# Altium footprint library MAJ library.PcbLib: 43 footprints (part 1 of 3)
Each footprint in its own frame and in the unit in brackets; x right, y up, seen from the top. Pads: shape width x height; smd on the part's side, far side on the other; paste and mask are expansions set on the pad; w line width, h text height; cw(c..) or ccw(c..) is an arc to the next point about the centre after c.
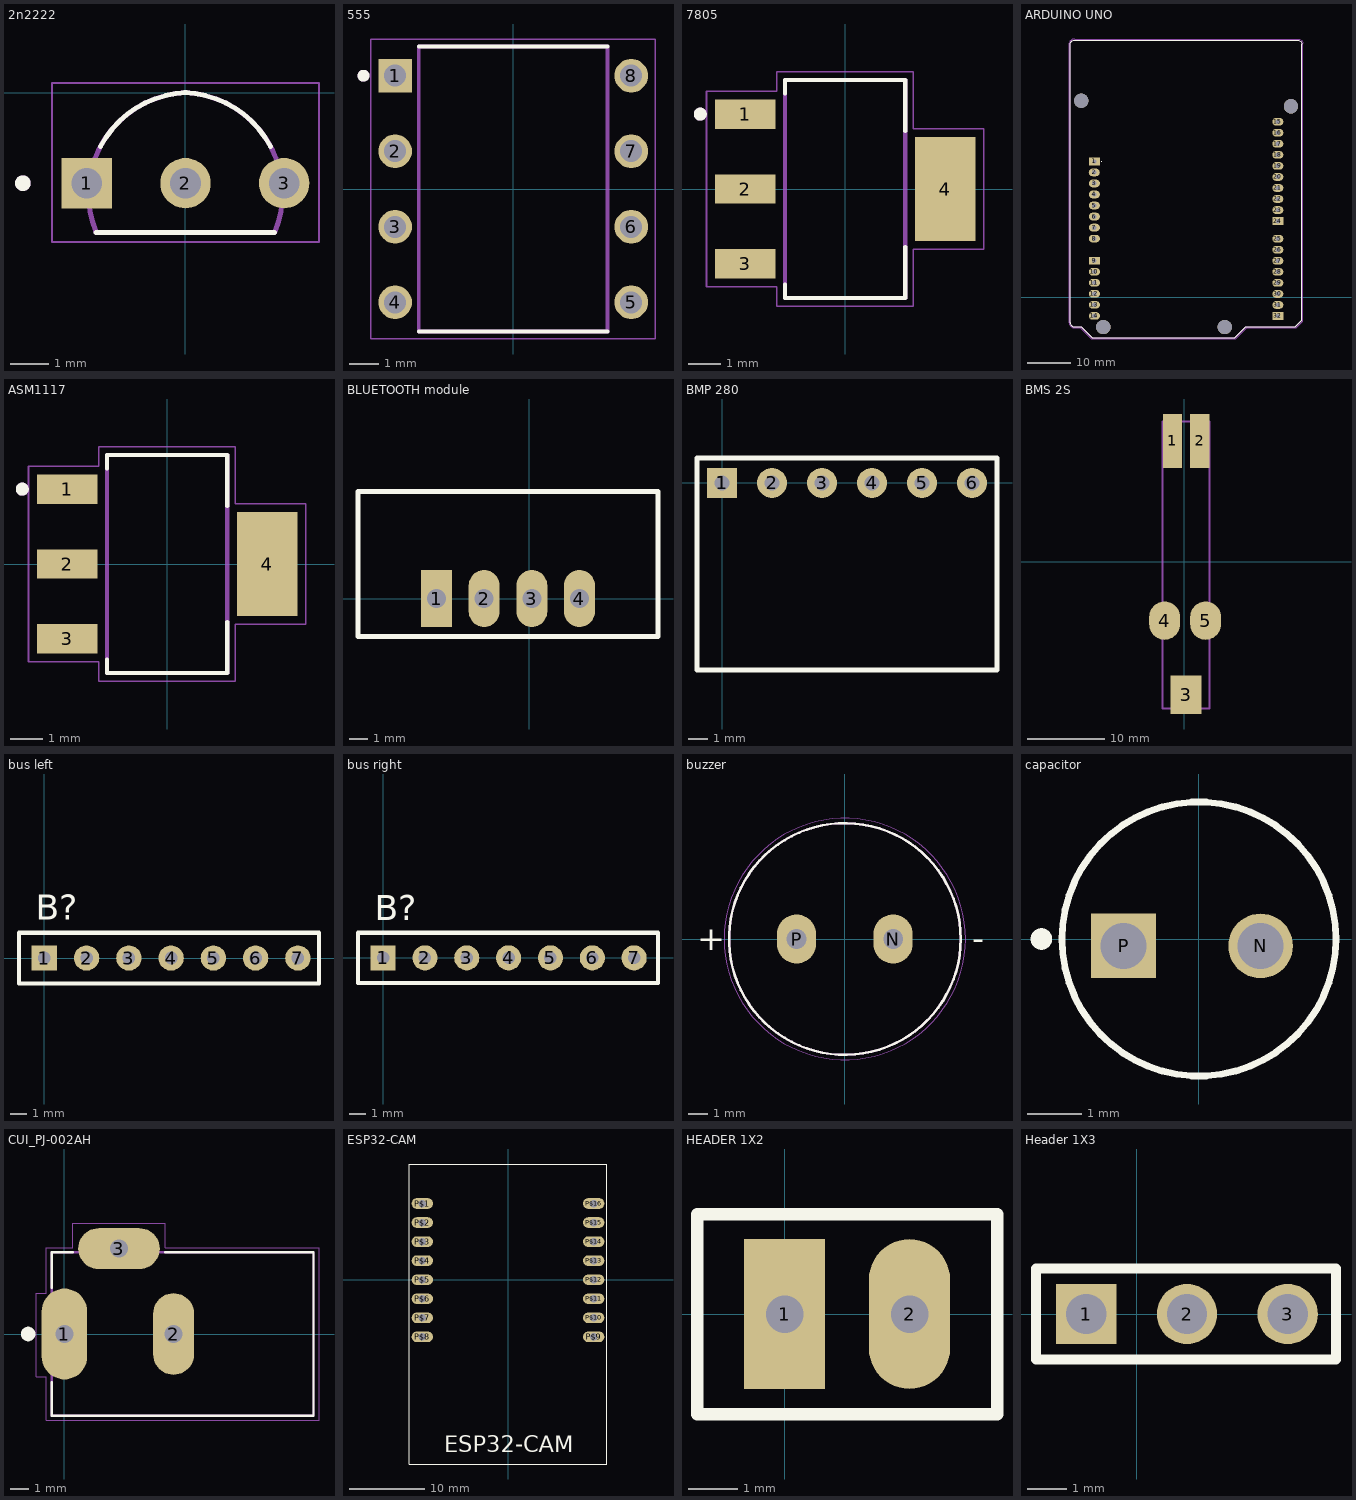
[diagram p0: the footprints below, top view; thin cyan lines are the x and y axes]

## 2n2222 [mm]
height 7.5
pads (3):
  rect 1.298x1.298 / inner round 1.298 / far side rect 1.298x1.298 hole 0.79: 1(-2.54,-2.33)
  round 1.298 hole 0.79: 2(0,-2.33) 3(2.54,-2.33)
Top Overlay:
  circle w0.2: c-4.189,-2.33 r0.1
  lines w0.127: -2.3,-3.6 2.3,-3.6 ; -2.19,-1.381 cw(c0.112,-2.605) 0.021,0.001 ; -0.021,0.001 cw(c-0.112,-2.605) 2.19,-1.381
Mechanical 13:
  circle w0.2: c-4.189,-2.33 r0.1
  lines w0.127: -2.307,-3.582 cw(c0.11,-2.605) 0.019,0.001 ; -2.3,-3.6 2.3,-3.6 ; -0.019,0.001 cw(c-0.11,-2.605) 2.307,-3.582
Mechanical 15:
  lines w0.05: -3.439,-3.85 -3.439,0.252 3.439,0.252 3.439,-3.85 -3.439,-3.85
3D body "step_temp.STEP": height 8.41, standoff -8.69, extent -2.813,-3.727 2.667,-0.127

## 555 [mm]
pads (8):
  rect 1.13x1.13 hole 0.74: 1(-3.97,3.81)
  round 1.13 hole 0.74: 2(-3.97,1.27) 3(-3.97,-1.27) 4(-3.97,-3.81) 5(3.97,-3.81) 6(3.97,-1.27) 7(3.97,1.27) 8(3.97,3.81)
Top Overlay:
  circle w0.2: c-5.035,3.81 r0.1
  lines w0.127: -3.175,-4.795 3.175,-4.795 ; -3.175,4.795 3.175,4.795
Mechanical 13:
  circle w0.2: c-5.035,3.81 r0.1
  lines w0.127: -3.175,-4.795 3.175,-4.795 3.175,4.795 -3.175,4.795 -3.175,-4.795
Mechanical 15:
  lines w0.05: -4.785,-5.045 4.785,-5.045 4.785,5.045 -4.785,5.045 -4.785,-5.045
3D body "step_temp.STEP": height 5.08, standoff -3.81, extent -3.937,-4.794 3.937,4.794

## 7805 [mm]
pads (4):
  rect 1.86x0.9 smd: 1(-3.075,2.3) 2(-3.075,0) 3(-3.075,-2.3)
  rect 1.86x3.19 smd: 4(3.075,0)
Top Overlay:
  circle w0.2: c-4.452,2.3 r0.1
  lines w0.127: -1.85,-2.933 -1.85,-3.35 1.85,-3.35 1.85,-1.779 ; -1.85,2.933 -1.85,3.35 1.85,3.35 1.85,1.779
Mechanical 13:
  circle w0.2: c-4.452,2.3 r0.1
  lines w0.127: -1.85,-3.35 1.85,-3.35 1.85,3.35 -1.85,3.35 -1.85,-3.35
Mechanical 15:
  lines w0.05: -4.26,-3 -2.1,-3 -2.1,-3.6 2.1,-3.6 2.1,-1.85 4.26,-1.85 4.26,1.85 2.1,1.85 2.1,3.6 -2.1,3.6 -2.1,3 -4.26,3 -4.26,-3
3D body "DCY0004A.stp": height 1.68, standoff 0, extent -3.601,-3.301 3.398,3.199

## ARDUINO UNO [mil]
pads (36):
  rect 100x70 / inner round 66 / far side rect 66x66 hole 40: 1(821,1231) 9(820,332) 24(2481.87,691) 32(2481.87,-169)
  oval 100x70 hole 40: 2(819,1132) 3(820,1032) 4(820,932) 5(820,832) 6(820,732) 7(820,632) 8(820,532) 10(820,232) 11(820,132) 12(820,32) 13(820,-68) 14(820,-168) 15(2481.87,1591) 16(2481.87,1491) 17(2481.87,1391) 18(2481.87,1291) 19(2481.87,1191) 20(2481.87,1091) 21(2481.87,991) 22(2481.87,891) 23(2481.87,791) 25(2481.87,531) 26(2481.87,431) 27(2481.87,331) 28(2481.87,231) 29(2481.87,131) 30(2481.87,31) 31(2481.87,-69)
  round 129.92 hole 129.92 unplated: ""(701.3,1780.63) ""(901.3,-269.37) ""(2001.3,-269.37) ""(2601.3,1730.63)
Top Overlay:
  lines w5: 601.24,-228.46 602.91,-238.46 606.24,-247.63 612.91,-255.96 621.24,-262.62 630.4,-265.95 640.4,-267.62 701.21,-267.62 801.17,-367.58 2089.89,-367.58 2189.85,-267.62 2639.69,-267.62 2699.67,-207.64 2699.67,2291.48 2698,2301.47 2693.84,2310.64 2688.01,2318.97 2679.68,2325.63 2670.51,2328.96 2659.68,2330.63 640.4,2330.63 630.4,2328.96 621.24,2325.63 612.91,2318.97 606.24,2310.64 602.91,2301.47 601.24,2291.48 601.24,-228.46
  lines w10: 886.63,1230.63 887,1231
Mechanical 13:
  lines w5: 601.24,-228.46 602.91,-238.46 606.24,-247.63 612.91,-255.96 621.24,-262.62 630.4,-265.95 640.4,-267.62 701.21,-267.62 801.17,-367.58 2089.89,-367.58 2189.85,-267.62 2639.69,-267.62 2699.67,-207.64 2699.67,2291.48 2698,2301.47 2693.84,2310.64 2688.01,2318.97 2679.68,2325.63 2670.51,2328.96 2659.68,2330.63 640.4,2330.63 630.4,2328.96 621.24,2325.63 612.91,2318.97 606.24,2310.64 602.91,2301.47 601.24,2291.48 601.24,-228.46
Mechanical 15:
  lines w1.97: 591.4,-228.46 591.4,2301.32 ; 591.44,-227.98 ccw(c642.92,-226.18) 640.22,-277.62 ; 591.48,2301.23 cw(c637.55,2293.93) 640.8,2340.46 ; 640.4,-277.46 691.37,-277.46 791.33,-377.43 2099.73,-377.43 2199.69,-277.46 2649.53,-277.46 2709.51,-217.48 2709.51,2301.32 2707.85,2311.32 2703.68,2320.48 2697.85,2328.81 2689.52,2335.47 2680.35,2338.81 2669.53,2340.47 640.67,2340.47 640.4,2340.47
3D body "step_temp.STEP": height 467.83, standoff -117.22, extent 601.3,-369.37 2701.3,2586.15

## ASM1117 [mm]
pads (4):
  rect 1.86x0.9 smd: 1(-3.075,2.3) 2(-3.075,0) 3(-3.075,-2.3)
  rect 1.86x3.19 smd: 4(3.075,0)
Top Overlay:
  circle w0.2: c-4.452,2.3 r0.1
  lines w0.127: -1.85,-2.933 -1.85,-3.35 1.85,-3.35 1.85,-1.779 ; -1.85,2.933 -1.85,3.35 1.85,3.35 1.85,1.779
Mechanical 13:
  circle w0.2: c-4.452,2.3 r0.1
  lines w0.127: -1.85,-3.35 1.85,-3.35 1.85,3.35 -1.85,3.35 -1.85,-3.35
Mechanical 15:
  lines w0.05: -4.26,-3 -2.1,-3 -2.1,-3.6 2.1,-3.6 2.1,-1.85 4.26,-1.85 4.26,1.85 2.1,1.85 2.1,3.6 -2.1,3.6 -2.1,3 -4.26,3 -4.26,-3
3D body "DCY0004A.stp": height 1.68, standoff 0, extent -3.576,-3.326 3.424,3.174

## BLUETOOTH module [mil]
pads (4):
  rect 65x120 hole 40: 1(-195,0)
  oval 65x120 hole 40: 2(-95,0) 3(5,0) 4(105,0)
Top Overlay:
  lines w10: -360,-80 270,-80 270,225 -360,225 -360,-80
3D body "HC_05 Blue Tooth Module.stp": height 1488.19, standoff -193.8, extent -361.92,-6.21 271.93,230.01

## BMP 280 [mil]
pads (7):
  round 60 hole 30: 1(0,0) 2(100,0) 3(200,0) 4(300,0) 5(400,0) 6(500,0)
  rect 60x60 hole 30: 1(0,0)
Top Overlay:
  lines w10: -50,-374 -50,50 550,50 550,-374.42 -49.58,-374.42 -50,-374
3D body "bmp280_module.stp": height 126.54, standoff -373.29, extent -48,-377.53 552,55.53

## BMS 2S [mm]
pads (5):
  rect 2.5x7 smd: 1(-1.524,15.748) 2(2.032,15.748)
  rect 4x5 smd: 3(0.254,-17.272)
  oval 4x5 smd: 4(-2.54,-7.62) 5(2.794,-7.62)
Mechanical 1:
  lines w0.254: -2.794,-19.05 -2.794,18.288 3.302,18.288 3.302,-19.05 -2.794,-19.05
  text "'.Designator" at 1.042,-18.313 h1.52

## bus left [mil]
pads (7):
  rect 60x60 hole 30: 1(0,0)
  round 60 hole 30: 2(100,0) 3(200,0) 4(300,0) 5(400,0) 6(500,0) 7(600,0)
Top Overlay:
  lines w10: -60,-60 650,-60 650,60 -60,60 -60,-60
  text "B?" at -20,90 h60
3D body "DW-07-09-S-S-405.stp": height 620.5, standoff -109.5, extent -50,-50 650,50

## bus right [mil]
pads (7):
  rect 60x60 hole 30: 1(0,0)
  round 60 hole 30: 2(100,0) 3(200,0) 4(300,0) 5(400,0) 6(500,0) 7(600,0)
Top Overlay:
  lines w10: 656.99,-23.01 656.99,23.01 ; -60,-60 650,-60 657,-60 657,60 650,60 -60,60 -60,-60
  text "B?" at -20,90 h60
3D body "DW-07-09-S-S-405.stp": height 620.5, standoff -109.5, extent -50,-50 650,50

## buzzer [mil]
pads (2):
  oval 80x100 hole 40: N(98.43,0) P(-98.43,0)
Top Overlay:
  circle w5: c0,0 r236.22
  text "+" at -301.39,-22.49 h50.1
  text "-" at 260.14,-22.48 h50.08
Mechanical 13:
  circle w5: c0,0 r236.22
Mechanical 15:
  circle w1.97: c0,0 r246.06
3D body "TMB12A05.step": height 374.41, standoff -92.13, extent -230.44,-226.22 242.01,246.22

## capacitor [mm]
pads (2):
  round 1.2 hole 0.85: N(1.143,-0.127)
  rect 1.2x1.2 / inner round 1.2 / far side rect 1.2x1.2 hole 0.85: P(-1.397,-0.127)
Top Overlay:
  circle w0.2: c-2.921,0 r0.1
  circle w0.127: c0,0 r2.54
3D body: height 11.4, standoff -4.7, extent -3.302,-3.277 2.998,3.023

## CUI_PJ-002AH [mm]
pads (3):
  oval 2.5x5 hole 1 square: 1(0,0)
  oval 2.25x4.5 hole 1 square: 2(6,0)
  oval 4.5x2.25 hole 1 square: 3(3,4.7)
Top Overlay:
  circle w0.4: c-2,0 r0.2
  lines w0.127: -0.7,-2.65 -0.7,-4.5 13.7,-4.5 13.7,4.5 5.55,4.5 ; -0.7,2.55 -0.7,4.5 0.45,4.5
Mechanical 13:
  lines w0.127: -0.7,-4.5 13.7,-4.5 13.7,4.5 -0.7,4.5 -0.7,-4.5
Mechanical 15:
  lines w0.05: -1.55,-2.35 -1.55,2.25 -1,2.25 -1,4.75 0.45,4.75 0.45,6.1 5.55,6.1 5.55,4.75 14,4.75 14,-4.75 -1,-4.75 -1,-2.35 -1.55,-2.35
3D body "PJ-002A--3DModel-STEP-269445.STEP": height 11.01, standoff -3.49, extent -0.684,-4.497 13.716,4.903

## ESP32-CAM [mil]
pads (16):
  oval 112x56 hole 39.37: P$1(-450,400) P$2(-450,300) P$3(-450,200) P$4(-450,100) P$5(-450,0) P$6(-450,-100) P$7(-450,-200) P$8(-450,-300) P$9(450,-300) P$10(450,-200) P$11(450,-100) P$12(450,0) P$13(450,100) P$14(450,200) P$15(450,300) P$16(450,400)
Top Overlay:
  lines w5: -518.11,-967.32 518.11,-967.32 518.11,607.48 -518.11,607.48 -518.11,-967.32
  text "ESP32-CAM" at -334.65,-905.51 h86
3D body "ESP3-CAM.STEP": height 467.08, standoff -244.81, extent -525.99,-988.24 537,606.24

## HEADER 1X2 [mil]
pads (2):
  rect 65x120 hole 30: 1(0,0)
  oval 65x120 hole 30: 2(100,0)
Top Overlay:
  lines w10: -70,-80 170,-80 170,80 60,80 -70,80 -70,-80
3D body "TS-102-T-G-1.stp": height 312, standoff -196, extent -53.99,-49.99 154.01,50.01

## Header 1X3 [mil]
pads (3):
  rect 60x60 hole 40: 1(-50,0)
  round 60 hole 40: 2(50,0) 3(150,0)
Top Overlay:
  lines w10: -100,-45 -100,45 198,45 198,-45 -100,-45
Mechanical 1:
  text "'.Designator" at -265,6.99 h60
3D body "CONN3X1_B3P-VH_JST.step": height 429.02, standoff -200, extent -184.86,-170 282.86,164.96